# Altium schematic symbol library Zworka.SchLib: 1 symbol
Pins are listed as number, name and electrical type; pins without a type are passive.

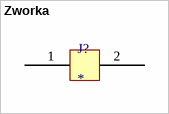
[diagram p0: symbol Zworka]

## Zworka
designator J?
footprint Zworka
pins: 1, 2